# Altium schematic symbol library BT_PDB_Lib.SchLib: 13 symbols
Pins are listed as number, name and electrical type; pins without a type are passive.

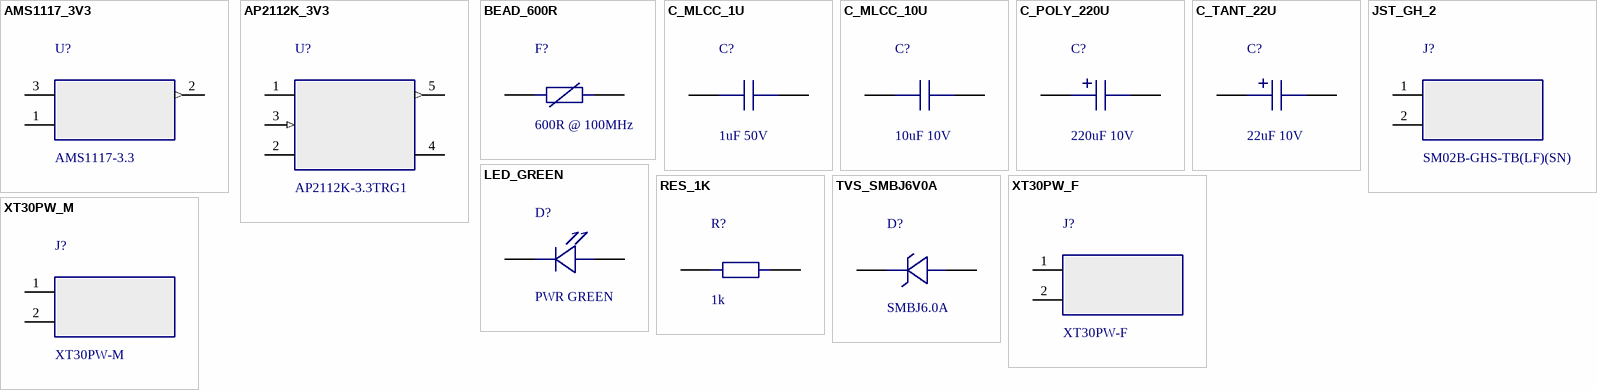
[diagram p0: symbols AMS1117_3V3 to XT30PW_M]

## AMS1117_3V3
designator U?, comment AMS1117-3.3
footprint SOT223_TAB2
pins: 1 GND (power), 2 VOUT / TAB (out), 3 VIN (power)

## AP2112K_3V3
designator U?, comment AP2112K-3.3TRG1
footprint SOT23_5
pins: 1 VIN (power), 2 GND (power), 3 EN (in), 4 NC, 5 VOUT (out)

## BEAD_600R
designator F?, comment 600R @ 100MHz
footprint FB0603
pins: 1, 2

## C_MLCC_1U
designator C?, comment 1uF 50V
footprint C0603
pins: 1, 2

## C_MLCC_10U
designator C?, comment 10uF 10V
footprint C0805
pins: 1, 2

## C_POLY_220U
designator C?, comment 220uF 10V
footprint ALPOLY_D6P3
pins: 1 +, 2 -

## C_TANT_22U
designator C?, comment 22uF 10V
footprint TANT_B3528
pins: 1 +, 2 -

## JST_GH_2
designator J?, comment SM02B-GHS-TB(LF)(SN)
footprint JST_GH_2_RA
pins: 1 V+, 2 GND

## LED_GREEN
designator D?, comment PWR GREEN
footprint LED0603
pins: 1 K, 2 A

## RES_1K
designator R?, comment 1k
footprint R0603
pins: 1, 2

## TVS_SMBJ6V0A
designator D?, comment SMBJ6.0A
footprint SMB_DO214AA
pins: 1 K, 2 A

## XT30PW_F
designator J?, comment XT30PW-F
footprint XT30PW_F
pins: 1 GND, 2 V+

## XT30PW_M
designator J?, comment XT30PW-M
footprint XT30PW_M
pins: 1 GND, 2 V+